# Altium footprint library Cole_.PcbLib: 175 footprints (part 5 of 11)
Each footprint in its own frame and in the unit in brackets; x right, y up, seen from the top. Pads: shape width x height; smd on the part's side, far side on the other; paste and mask are expansions set on the pad; w line width, h text height; cw(c..) or ccw(c..) is an arc to the next point about the centre after c.
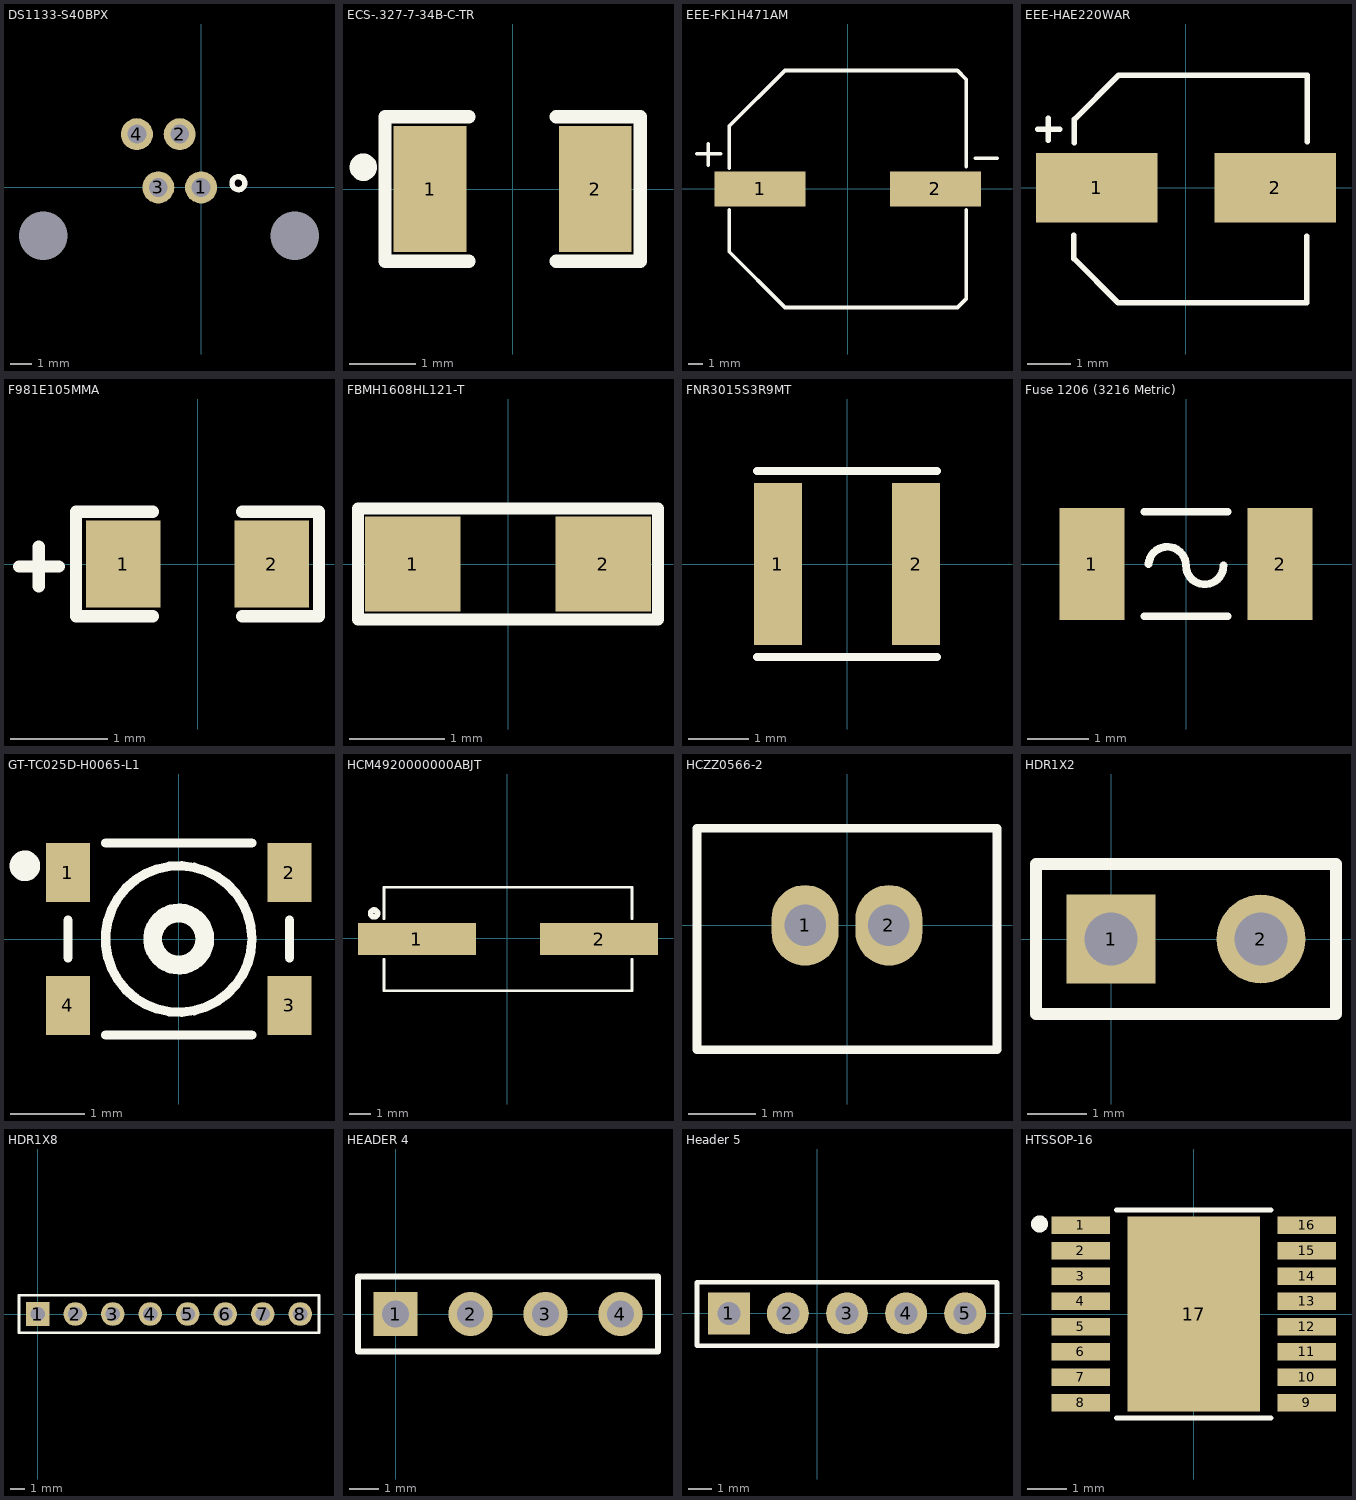
[diagram p4: the footprints below, top view; thin cyan lines are the x and y axes]

## DS1133-S40BPX [mm] "RJ11 4 1 Unshielded Through Hole Ethernet Connectors/Modular Connectors (RJ45 RJ11) RoHS"
pads (6):
  round 1.524 hole 0.9: 1(0,0) 2(-1.02,2.54) 3(-2.04,0) 4(-3.06,2.54)
  round 0 hole 2.3 unplated: MH1(4.47,-2.3) MH2(-7.53,-2.3)
Top Overlay:
  circle w0.254: c1.778,0.203 r0.307
3D body "RJ11.step": height 14.5, standoff -3.2, extent -8.797,-8.354 5.537,4.646

## ECS-.327-7-34B-C-TR [mm] "CRYSTAL 32.7680KHZ 12.5PF SMD"
pads (2):
  rect 1.1x1.9 smd: 1(-1.25,0) 2(1.25,0)
Top Overlay:
  circle w0.254: c-2.261,0.33 r0.08
  lines w0.2: -0.66,-1.092 -1.93,-1.092 -1.93,1.092 -0.66,1.092 ; 0.66,-1.092 1.93,-1.092 1.93,1.092 0.66,1.092
3D body "ECS-.327-12.5-34B-C-TR--3DModel-STEP-40055.STEP": height 0.87, standoff -0.03, extent -1.6,-0.775 1.6,0.725

## EEE-FK1H471AM [mm] "CAP ALUM 470UF 20% 50V SMD"
pads (2):
  rect 6.5x2.5 smd: 1(-6.25,0) 2(6.25,0)
Top Overlay:
  lines w0.254: -10.744,2.489 -9.068,2.489 ; -9.931,1.702 -9.931,3.226 ; -8.458,1.473 -8.458,4.458 -4.476,8.441 7.823,8.441 ; -8.456,-1.49 -8.456,-4.476 -4.473,-8.458 7.826,-8.458 ; 7.826,-8.457 8.462,-7.82 8.462,-1.499 ; 8.46,1.574 8.46,7.803 7.823,8.44 ; 9.093,2.184 10.643,2.184 ; 7.823,8.44 7.823,8.441
3D body "16 SIZE CODE J16.stp": height 16.5, standoff 0, extent -9.2,-8.5 9.2,8.5

## EEE-HAE220WAR [mm] "CAP ALUM 22UF 20% 25V SMD"
pads (2):
  rect 2.8x1.6 smd: 1(-2.05,0) 2(2.05,0)
Top Overlay:
  lines w0.127: -3.409,1.353 -2.899,1.353 ; -3.166,1.092 -3.166,1.6 ; -2.58,-1.092 -2.58,-1.626 -1.564,-2.642 2.78,-2.642 2.78,-1.118 ; -2.567,1.041 -2.567,1.575 -1.551,2.591 2.792,2.591 2.792,1.067
3D body "5 SIZE CODE C.stp": height 5.8, standoff 0, extent -3,-2.65 3,2.65

## F981E105MMA [mil]
pads (2):
  rect 30x35 smd mask+2.36: 1(-30,0) 2(30,0)
Top Overlay:
  lines w5: -72,-1 -56,-1 ; -64,-9 -64,7 ; -18,-21 -49,-21 -49,21 -18,21 ; 18,-21 49,-21 49,21 18,21
3D body "User Library-CAPC1608X09.step": height 34.25, standoff -1.18, extent -31.51,-15.75 31.49,15.74

## FBMH1608HL121-T [mm] "FERRITE BEAD 120 OHM 0603 1LN"
pads (2):
  rect 1x1 smd: 1(-1,0) 2(1,0)
Top Overlay:
  lines w0.127: -1.575,-0.584 1.575,-0.584 1.575,0.584 -1.575,0.584 -1.575,-0.584
3D body "FBMH1608HL121-T.STEP": height 0.9, standoff 0, extent -0.8,-0.4 0.8,0.4

## FNR3015S3R9MT [mm]
pads (2):
  rect 0.8x2.7 smd: 1(-1.15,0) 2(1.15,0)
Top Overlay:
  lines w0.127: -1.5,-1.551 1.5,-1.551 ; -1.5,1.551 1.5,1.551
3D body "FNR3015S3R9MT.STEP": height 1.52, standoff 0, extent -1.5,-1.5 1.5,1.5

## Fuse 1206 (3216 Metric) [mm] "0.126\" L x 0.062\" W x 0.026\" H (3.20mm x 1.58mm x 0.65mm)"
pads (2):
  rect 1.06x1.82 smd: 1(-1.528,0) 2(1.528,0)
Top Overlay:
  lines w0.127: -0.68,-0.849 0.68,-0.849 ; -0.68,0.849 0.68,0.849 ; -0.609,-0.002 cw(c-0.305,-0.025) 0,-0.025 ccw(c0.305,-0.025) 0.61,-0.025
3D body "0685H9150-01.STEP": height 0.85, standoff 0, extent -1.6,-0.79 1.6,0.79

## GT-TC025D-H0065-L1 [mm]
pads (4):
  rect 0.6x0.8 smd: 1(-1.5,0.9) 2(1.5,0.9) 3(1.5,-0.9) 4(-1.5,-0.9)
Top Overlay:
  circle w0.254: c-2.083,0.991 r0.08
  circle w0.127: c0,0 r0.992
  circle w0.254: c0,0 r0.353
  lines w0.127: -1.5,-0.253 -1.5,0.253 ; -0.991,-1.3 0.991,-1.3 ; -0.991,1.3 0.991,1.3 ; 1.5,-0.253 1.5,0.253
3D body "2009031909_G-Switch-GT-TC025D-H0065-L1_C778132.STEP": height 0.6, standoff -0.05, extent -1.7,-1.3 1.7,1.3

## HCM4920000000ABJT [mm] "CRYSTAL 20.0000MHZ 18PF SMD"
pads (2):
  rect 5.5x1.5 smd: 1(-4.225,-0.025) 2(4.275,-0.025)
Top Overlay:
  circle w0.254: c-6.223,1.168 r0.163
  lines w0.127: -5.765,-0.965 -5.765,-2.441 5.814,-2.441 ; -5.765,0.914 -5.765,2.39 5.814,2.39 ; 5.816,-2.441 5.816,-0.965 ; 5.816,0.914 5.816,2.39
3D body "User Library-Crystal HC49_US-SM.STEP": height 4.3, standoff 0, extent -6.374,-2.44 6.426,2.39

## HCZZ0566-2 [mm]
pads (2):
  oval 1x1.2 hole 0.62: 1(-0.625,0) 2(0.625,0)
Top Overlay:
  lines w0.127: -2.235,-1.854 -2.235,1.448 2.235,1.448 2.235,-1.854 -2.235,-1.854
3D body "Hong Cheng HCZZ0566-2.STEP": height 4.6, standoff -2.25, extent -2.2,-1.802 2.2,1.448

## HDR1X2 [mm] "CONN HEADER VERT 2POS 2.54MM"
pads (2):
  rect 1.5x1.5 hole 0.9: 1(0,0)
  round 1.5 hole 0.9: 2(2.54,0)
Top Overlay:
  lines w0.2: -1.27,-1.27 -1.27,1.27 3.81,1.27 3.81,-1.27 -1.27,-1.27
3D body "User Library-Header1x2.STEP": height 8.44, standoff -2.54, extent -1.27,-1.27 3.81,1.27

## HDR1X8 [mm] "Connector; Header; 8 Position"
pads (8):
  rect 1.6x1.6 hole 0.95: 1(0,0)
  round 1.6 hole 0.95: 2(2.54,0) 3(5.08,0) 4(7.62,0) 5(10.16,0) 6(12.7,0) 7(15.24,0) 8(17.78,0)
Top Overlay:
  lines w0.2: -1.27,-1.27 -1.27,1.27 19.05,1.27 19.05,-1.27 -1.27,-1.27
3D body "User Library-1x8 TH Pitch 2_54mm.STEP": height 9.4, standoff -3.3, extent -1.244,-1.244 19.076,1.296

## HEADER 4 [mm] "4 Pin Header (2.54mm)"
pads (4):
  rect 1.5x1.5 hole 0.9: 1(0,0)
  round 1.5 hole 0.9: 2(2.54,0) 3(5.08,0) 4(7.62,0)
Top Overlay:
  lines w0.2: -1.27,-1.27 8.89,-1.27 8.89,1.27 -1.27,1.27 -1.27,-1.27
3D body "User Library-Header_Male_4Pin.STEP": height 8.54, standoff -3, extent -1.27,-1.27 8.89,1.22

## Header 5 [mm] "Connector Header Through Hole 5 position 0.100\" (2.54mm)"
pads (5):
  rect 1.8x1.8 hole 1: 1(-3.81,0)
  round 1.8 hole 1: 2(-1.27,0) 3(1.27,0) 4(3.81,0) 5(6.35,0)
Top Overlay:
  lines w0.2: -5.182,-1.397 -5.182,1.346 7.722,1.346 7.722,-1.397 -5.182,-1.397
3D body "Pin Header 1x5 TH Pitch 2.54mm.stp": height 9.52, standoff -3.18, extent -5.08,-1.295 7.62,1.245

## HTSSOP-16 [mm]
pads (17):
  rect 1.5x0.45 smd: 1(-2.9,2.275) 2(-2.9,1.625) 3(-2.9,0.975) 4(-2.9,0.325) 5(-2.9,-0.325) 6(-2.9,-0.975) 7(-2.9,-1.625) 8(-2.9,-2.275) 9(2.9,-2.275) 10(2.9,-1.625) 11(2.9,-0.975) 12(2.9,-0.325) 13(2.9,0.325) 14(2.9,0.975) 15(2.9,1.625) 16(2.9,2.275)
  rect 3.4x5 smd: 17(0,0)
Top Overlay:
  circle w0.254: c-3.962,2.311 r0.092
  lines w0.127: -1.981,-2.667 1.981,-2.667 ; -1.981,2.667 1.981,2.667
3D body "LM43603PWPR.STEP": height 1.2, standoff 0, extent -3.2,-2.5 3.2,2.5